# Altium footprint library main.PcbLib: 21 footprints (part 2 of 2)
Each footprint in its own frame and in the unit in brackets; x right, y up, seen from the top. Pads: shape width x height; smd on the part's side, far side on the other; paste and mask are expansions set on the pad; w line width, h text height; cw(c..) or ccw(c..) is an arc to the next point about the centre after c.
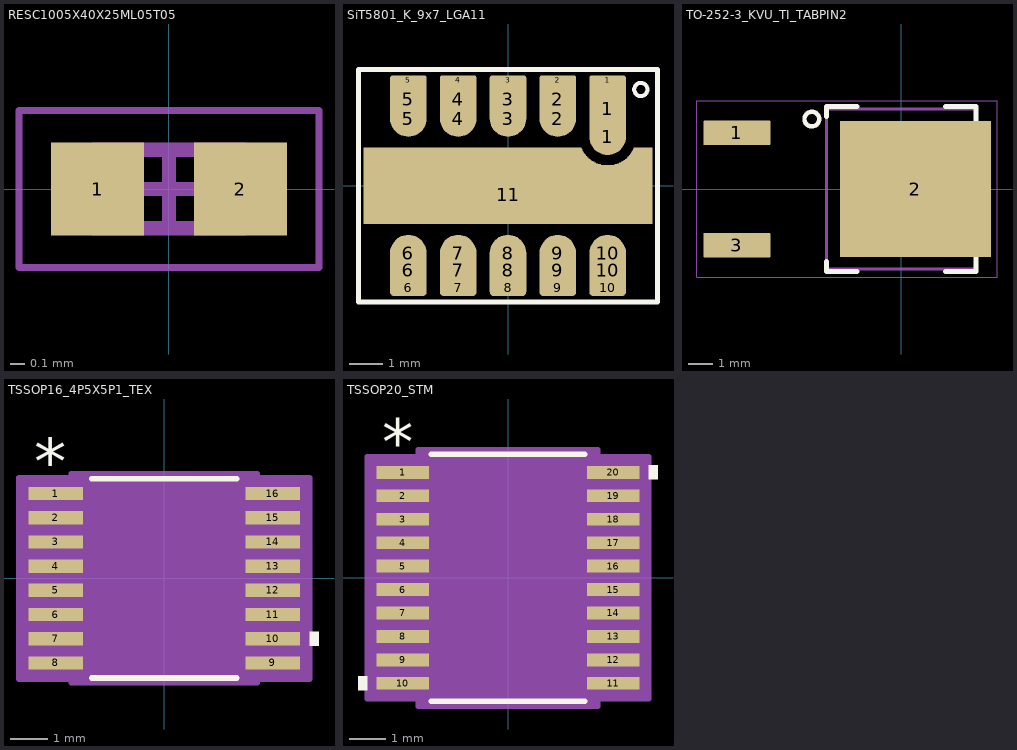
[diagram p1: the footprints below, top view; thin cyan lines are the x and y axes]

## RESC1005X40X25ML05T05 [mm] "Chip Resistor, 2-Leads, Body 1.05x0.55mm, IPC Low Density"
height 0.4
pads (2):
  rect 0.65x0.65 smd: 1(-0.5,0) 2(0.5,0)
Top 3D Body:
  lines w0.1: -0.525,-0.275 -0.525,0.275 0.525,0.275 0.525,-0.275 -0.525,-0.275
Top Courtyard:
  lines w0.05: -1.05,-0.55 -1.05,0.55 1.05,0.55 1.05,-0.55 -1.05,-0.55
  lines w0.1: -0.275,0 0.275,0 ; 0,-0.275 0,0.275
3D body "RESC1005X04M.step": height 0.4, standoff 0, extent -0.525,-0.275 0.525,0.275

## SiT5801_K_9x7_LGA11 [mm] "SiTime SiT5801 9.0 x 7.0 mm LGA-11, Rev 0.26 recommended land pattern. All ten peripheral lands use asymmetric end radii: pins 1-5 have R0.15 outer/top corners and R0.55 inner/bottom ends; pins 6-10 have R0.55 inner/top ends and R0.25 outer/bottom corners. Pin 1 is extended inward per the 1.85-mm top-edge-to-arc-centre dimension. Pin 11 is a compound GND land with a conservative 25-um staircase approximation of the R0.85 concave recess; nominal radial Pin1-to-GND clearance 0.30 mm."
pads (73):
  round 1.1 smd: 1(3,1.475) 2(1.5,2.025) 3(0,2.025) 4(-1.5,2.025) 5(-3,2.025) 6(-3,-2.025) 7(-1.5,-2.025) 8(0,-2.025) 9(1.5,-2.025) 10(3,-2.025)
  rect 1.1x1.7 smd: 1(3,2.325)
  rrect50% 1.1x0.3 smd: 1(3,3.175) 2(1.5,3.175) 3(0,3.175) 4(-1.5,3.175) 5(-3,3.175)
  rect 1.1x1.15 smd: 2(1.5,2.6) 3(0,2.6) 4(-1.5,2.6) 5(-3,2.6)
  rrect50% 1.1x0.5 smd: 6(-3,-3.075) 7(-1.5,-3.075) 8(0,-3.075) 9(1.5,-3.075) 10(3,-3.075)
  rect 1.1x1.05 smd: 6(-3,-2.55) 7(-1.5,-2.55) 8(0,-2.55) 9(1.5,-2.55) 10(3,-2.55)
  rect 6.565x0.025 smd: 11(-1.068,1.138)
  rect 6.575x0.025 smd: 11(-1.062,1.112)
  rect 6.587x0.025 smd: 11(-1.056,1.088)
  rect 6.6x0.025 smd: 11(-1.05,1.062)
  rect 6.614x0.025 smd: 11(-1.043,1.038)
  rect 6.629x0.025 smd: 11(-1.036,1.012)
  rect 6.645x0.025 smd: 11(-1.027,0.988)
  rect 6.663x0.025 smd: 11(-1.019,0.962)
  rect 6.682x0.025 smd: 11(-1.009,0.937)
  rect 6.702x0.025 smd: 11(-0.999,0.913)
  rect 6.724x0.025 smd: 11(-0.988,0.887)
  rect 6.748x0.025 smd: 11(-0.976,0.863)
  rect 6.774x0.025 smd: 11(-0.963,0.837)
  rect 6.802x0.025 smd: 11(-0.949,0.813)
  rect 6.833x0.025 smd: 11(-0.933,0.787)
  rect 6.868x0.025 smd: 11(-0.916,0.763)
  rect 6.906x0.025 smd: 11(-0.897,0.737)
  rect 6.95x0.025 smd: 11(-0.875,0.713)
  rect 7.001x0.025 smd: 11(-0.85,0.687)
  rect 7.063x0.025 smd: 11(-0.819,0.663)
  rect 7.145x0.025 smd: 11(-0.777,0.637)
  rect 8.7x1.775 smd: 11(0,-0.262)
  rect 1.145x0.025 smd: 11(3.777,0.637)
  rect 1.063x0.025 smd: 11(3.819,0.663)
  rect 1.001x0.025 smd: 11(3.85,0.687)
  rect 0.95x0.025 smd: 11(3.875,0.713)
  rect 0.906x0.025 smd: 11(3.897,0.737)
  rect 0.868x0.025 smd: 11(3.916,0.763)
  rect 0.833x0.025 smd: 11(3.933,0.787)
  rect 0.802x0.025 smd: 11(3.949,0.813)
  rect 0.774x0.025 smd: 11(3.963,0.837)
  rect 0.748x0.025 smd: 11(3.976,0.863)
  rect 0.724x0.025 smd: 11(3.988,0.887)
  rect 0.702x0.025 smd: 11(3.999,0.913)
  rect 0.682x0.025 smd: 11(4.009,0.937)
  rect 0.663x0.025 smd: 11(4.019,0.962)
  rect 0.645x0.025 smd: 11(4.027,0.988)
  rect 0.629x0.025 smd: 11(4.036,1.012)
  rect 0.614x0.025 smd: 11(4.043,1.038)
  rect 0.6x0.025 smd: 11(4.05,1.062)
  rect 0.587x0.025 smd: 11(4.056,1.088)
  rect 0.575x0.025 smd: 11(4.062,1.112)
  rect 0.565x0.025 smd: 11(4.068,1.138)
Top Overlay:
  circle w0.12: c4,2.9 r0.2
  lines w0.15: -4.5,-3.5 -4.5,3.5 4.5,3.5 4.5,-3.5 -4.5,-3.5
Top Assembly:
  lines w0.1: -4.5,-3.5 -4.5,3.5 4.5,3.5 4.5,-3.5 -4.5,-3.5
3D body "OCXO_9070_10pins.stp": height 3.6, standoff -0.03, extent -4.5,-3.5 4.5,3.5

## TO-252-3_KVU_TI_TABPIN2 [mm] "TI KVU0003A TO-252 land pattern for TLV76133KVU; short centre lead and large exposed tab are both electrically pad 2 (OUT)"
height 2.52
pads (23):
  rrect10% 2.75x1 smd: 1(-6.7,2.29) 3(-6.7,-2.29)
  rect 6.15x5.55 smd paste-4: 2(0.575,0)
  rrect50% 0.98x1.13 on Top Paste: ""(-1.785,-1.995) ""(-1.785,-0.665) ""(-1.785,0.665) ""(-1.785,1.995) ""(-0.605,-1.995) ""(-0.605,-0.665) ""(-0.605,0.665) ""(-0.605,1.995) ""(0.575,-1.995) ""(0.575,-0.665) ""(0.575,0.665) ""(0.575,1.995) ""(1.755,-1.995) ""(1.755,-0.665) ""(1.755,0.665) ""(1.755,1.995) ""(2.935,-1.995) ""(2.935,-0.665) ""(2.935,0.665) ""(2.935,1.995)
Top Overlay:
  circle w0.18: c-3.65,2.85 r0.3
  lines w0.2: -3.05,-2.95 -3.05,-3.36 -1.8,-3.36 ; -3.05,2.95 -3.05,3.36 -1.8,3.36 ; 1.8,-3.36 3.05,-3.36 3.05,3.36 1.8,3.36
Top Assembly:
  lines w0.12: -3.05,-3.263 -3.05,3.263 3.05,3.263 3.05,-3.263 -3.05,-3.263
Top Courtyard:
  lines w0.05: -8.33,-3.6 -8.33,3.6 3.9,3.6 3.9,-3.6 -8.33,-3.6
3D body "TLV76133KVU_TO-252.step": height 2.52, standoff 0, extent -7.112,-3.35 2.588,3.35

## TSSOP16_4P5X5P1_TEX [mm]
pads (16):
  rect 1.462x0.355 smd paste+0 mask+0: 1(-2.921,2.275) 2(-2.921,1.625) 3(-2.921,0.975) 4(-2.921,0.325) 5(-2.921,-0.325) 6(-2.921,-0.975) 7(-2.921,-1.625) 8(-2.921,-2.275) 9(2.921,-2.275) 10(2.921,-1.625) 11(2.921,-0.975) 12(2.921,-0.325) 13(2.921,0.325) 14(2.921,0.975) 15(2.921,1.625) 16(2.921,2.275)
Top Overlay:
  region: 3.906,-1.435 4.16,-1.435 4.16,-1.816 3.906,-1.816
  lines w0.152: -1.947,-2.68 1.947,-2.68 ; -1.947,2.68 1.947,2.68
  text "*" at -3.492,2.503 h1.27
Top 3D Body:
  lines w0.025: -0.305,2.553 ccw(c0,2.553) 0.305,2.553 ; -3.302,-2.427 -3.302,-2.123 -2.248,-2.123 -2.248,-2.427 -3.302,-2.427 ; -3.302,-1.777 -3.302,-1.473 -2.248,-1.473 -2.248,-1.777 -3.302,-1.777 ; -3.302,-1.127 -3.302,-0.823 -2.248,-0.823 -2.248,-1.127 -3.302,-1.127 ; -3.302,-0.477 -3.302,-0.173 -2.248,-0.173 -2.248,-0.477 -3.302,-0.477 ; -3.302,0.173 -3.302,0.477 -2.248,0.477 -2.248,0.173 -3.302,0.173 ; -3.302,0.823 -3.302,1.127 -2.248,1.127 -2.248,0.823 -3.302,0.823 ; -3.302,1.473 -3.302,1.777 -2.248,1.777 -2.248,1.473 -3.302,1.473 ; -3.302,2.123 -3.302,2.427 -2.248,2.427 -2.248,2.123 -3.302,2.123 ; -2.248,-2.553 2.248,-2.553 2.248,2.553 -2.248,2.553 -2.248,-2.553 ; 2.248,-2.427 2.248,-2.123 3.302,-2.123 3.302,-2.427 2.248,-2.427 ; 2.248,-1.777 2.248,-1.473 3.302,-1.473 3.302,-1.777 2.248,-1.777 ; 2.248,-1.127 2.248,-0.823 3.302,-0.823 3.302,-1.127 2.248,-1.127 ; 2.248,-0.477 2.248,-0.173 3.302,-0.173 3.302,-0.477 2.248,-0.477 ; 2.248,0.173 2.248,0.477 3.302,0.477 3.302,0.173 2.248,0.173 ; 2.248,0.823 2.248,1.127 3.302,1.127 3.302,0.823 2.248,0.823 ; 2.248,1.473 2.248,1.777 3.302,1.777 3.302,1.473 2.248,1.473 ; 2.248,2.123 2.248,2.427 3.302,2.427 3.302,2.123 2.248,2.123
  text "*" at -2.184,1.206 h1.27
  text ".Designator" at -3.492,-0.635 h1.27
Top Courtyard:
  region: -2.502,-2.706 -3.906,-2.706 -3.906,2.706 -2.502,2.706 -2.502,2.807 2.502,2.807 2.502,2.706 3.906,2.706 3.906,-2.706 2.502,-2.706 2.502,-2.807 -2.502,-2.807
  lines w0.152: -3.906,-2.706 -3.906,2.706 -2.502,2.706 -2.502,2.807 2.502,2.807 2.502,2.706 3.906,2.706 3.906,-2.706 2.502,-2.706 2.502,-2.807 -2.502,-2.807 -2.502,-2.706 -3.906,-2.706
3D body "TSSOP16_4P5X5P1_TEX.step": height 1.2, standoff 0, extent -3.302,-2.553 3.302,2.553

## TSSOP20_STM [mm]
pads (20):
  rect 1.462x0.355 smd paste+0 mask+0: 1(-2.921,2.925) 2(-2.921,2.275) 3(-2.921,1.625) 4(-2.921,0.975) 5(-2.921,0.325) 6(-2.921,-0.325) 7(-2.921,-0.975) 8(-2.921,-1.625) 9(-2.921,-2.275) 10(-2.921,-2.925) 11(2.921,-2.925) 12(2.921,-2.275) 13(2.921,-1.625) 14(2.921,-0.975) 15(2.921,-0.325) 16(2.921,0.325) 17(2.921,0.975) 18(2.921,1.625) 19(2.921,2.275) 20(2.921,2.925)
Top Overlay:
  region: 3.906,3.115 4.16,3.115 4.16,2.734 3.906,2.734
  region: -3.906,-2.734 -4.16,-2.734 -4.16,-3.115 -3.906,-3.115
  lines w0.152: -2.126,-3.429 2.126,-3.429 ; -2.126,3.429 2.126,3.429
  text "*" at -3.492,3.153 h1.27
Top 3D Body:
  lines w0.025: -0.305,3.302 ccw(c0,3.302) 0.305,3.302 ; -3.302,-3.077 -2.235,-3.077 -2.235,-2.773 -3.302,-2.773 -3.302,-3.077 ; -3.302,-2.427 -2.235,-2.427 -2.235,-2.123 -3.302,-2.123 -3.302,-2.427 ; -3.302,-1.777 -2.235,-1.777 -2.235,-1.473 -3.302,-1.473 -3.302,-1.777 ; -3.302,-1.127 -2.235,-1.127 -2.235,-0.823 -3.302,-0.823 -3.302,-1.127 ; -3.302,-0.477 -2.235,-0.477 -2.235,-0.173 -3.302,-0.173 -3.302,-0.477 ; -3.302,0.173 -2.235,0.173 -2.235,0.477 -3.302,0.477 -3.302,0.173 ; -3.302,0.823 -2.235,0.823 -2.235,1.127 -3.302,1.127 -3.302,0.823 ; -3.302,1.473 -2.235,1.473 -2.235,1.777 -3.302,1.777 -3.302,1.473 ; -3.302,2.123 -2.235,2.123 -2.235,2.427 -3.302,2.427 -3.302,2.123 ; -3.302,2.773 -2.235,2.773 -2.235,3.077 -3.302,3.077 -3.302,2.773 ; -2.235,-3.302 -2.235,3.302 2.235,3.302 2.235,-3.302 -2.235,-3.302 ; 2.235,-3.077 3.302,-3.077 3.302,-2.773 2.235,-2.773 2.235,-3.077 ; 2.235,-2.427 3.302,-2.427 3.302,-2.123 2.235,-2.123 2.235,-2.427 ; 2.235,-1.777 3.302,-1.777 3.302,-1.473 2.235,-1.473 2.235,-1.777 ; 2.235,-1.127 3.302,-1.127 3.302,-0.823 2.235,-0.823 2.235,-1.127 ; 2.235,-0.477 3.302,-0.477 3.302,-0.173 2.235,-0.173 2.235,-0.477 ; 2.235,0.173 3.302,0.173 3.302,0.477 2.235,0.477 2.235,0.173 ; 2.235,0.823 3.302,0.823 3.302,1.127 2.235,1.127 2.235,0.823 ; 2.235,1.473 3.302,1.473 3.302,1.777 2.235,1.777 2.235,1.473 ; 2.235,2.123 3.302,2.123 3.302,2.427 2.235,2.427 2.235,2.123 ; 2.235,2.773 3.302,2.773 3.302,3.077 2.235,3.077 2.235,2.773
  text "*" at -2.172,1.956 h1.27
  text ".Designator" at -3.492,-0.635 h1.27
Top Courtyard:
  region: -2.489,-3.356 -3.906,-3.356 -3.906,3.356 -2.489,3.356 -2.489,3.556 2.489,3.556 2.489,3.356 3.906,3.356 3.906,-3.356 2.489,-3.356 2.489,-3.556 -2.489,-3.556
  lines w0.152: -3.906,-3.356 -2.489,-3.356 -2.489,-3.556 2.489,-3.556 2.489,-3.356 3.906,-3.356 3.906,3.356 2.489,3.356 2.489,3.556 -2.489,3.556 -2.489,3.356 -3.906,3.356 -3.906,-3.356
3D body "TSSOP20_STM.step": height 1.2, standoff 0, extent -3.302,-3.302 3.302,3.302
3D body "TSSOP20_STM.step": height 1.2, standoff 0, extent -3.302,-3.302 3.302,3.302